# Altium footprint library NEXUS32.PcbLib: 39 footprints (part 1 of 3)
Each footprint in its own frame and in the unit in brackets; x right, y up, seen from the top. Pads: shape width x height; smd on the part's side, far side on the other; paste and mask are expansions set on the pad; w line width, h text height; cw(c..) or ccw(c..) is an arc to the next point about the centre after c.
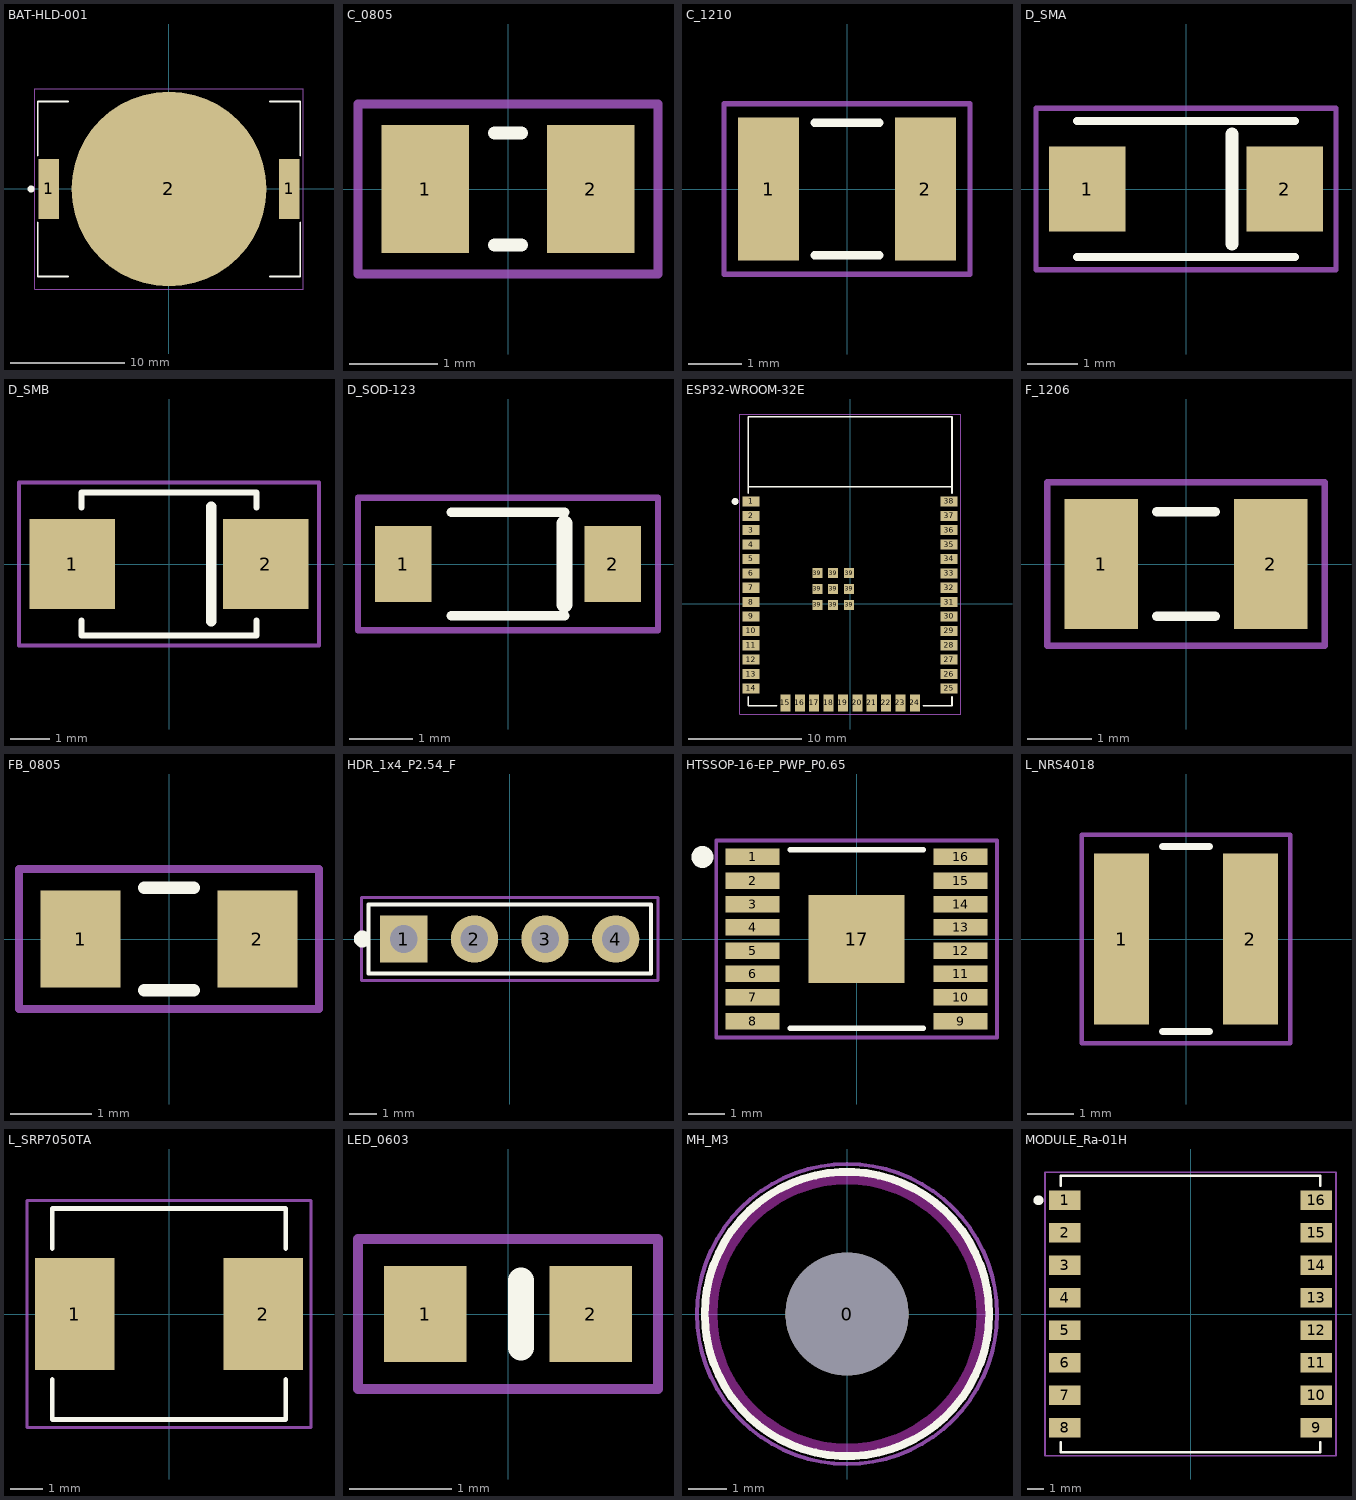
[diagram p0: the footprints below, top view; thin cyan lines are the x and y axes]

## BAT-HLD-001 [mil] "Portapilas CR2032 SMD TE BAT-HLD-001; pad 1 = (+) pestanas laterales, pad 2 = (-) pad central 17mm"
height 165.39
pads (3):
  rect 71x205 smd: 1(-413,0) 1(413,0)
  round 669 smd: 2(0,0)
Top Overlay:
  circle w12: c-474,0 r6
  lines w6: -451,-114 -451,-301 -346,-301 ; -451,114 -451,301 -346,301 ; 346,-301 451,-301 451,-114 ; 346,301 451,301 451,114
Mechanical 1:
  lines w4: -461,-344 -461,344 461,344 461,-344 -461,-344
3D body "BAT-HLD-001.step": height 165.39, standoff 0, extent -450.79,-300.65 450.79,305.74

## C_0805 [mil] "Condensador/ferrita 0805 (2012 metrico)"
height 51.18
pads (2):
  rect 39x57 smd: 1(-37,0) 2(37,0)
Top Overlay:
  lines w6: -6,-25 6,-25 ; -6,25 6,25
Mechanical 1:
  lines w4: -67,-38 -67,38 67,38 67,-38 -67,-38
3D body "C_0805.step": height 51.18, standoff 0, extent -39.37,-25.59 39.37,25.59

## C_1210 [mil] "Condensador 1210 (3225 metrico)"
height 98.43
pads (2):
  rect 45x106 smd: 1(-58,0) 2(58,0)
Top Overlay:
  lines w6: -24,-49 24,-49 ; -24,49 24,49
Mechanical 1:
  lines w4: -91,-63 91,-63 91,63 -91,63 -91,-63
3D body "C_1210.step": height 98.43, standoff 0, extent -62.99,-49.21 62.99,49.21

## D_SMA [mil] "Diodo SMA (DO-214AC) SS54; pad 1 = anodo, pad 2 = catodo (barra junto al pad 2)"
height 82.68
pads (2):
  rect 60x66 smd: 1(-77,0) 2(77,0)
Top Overlay:
  lines w6: -85,-53 85,-53 ; -85,53 85,53
  lines w10: 36,-43 36,43
Mechanical 1:
  lines w4: -117,-63 117,-63 117,63 -117,63 -117,-63
3D body "D_SMA.step": height 82.68, standoff 0, extent -102.36,-55.12 102.36,55.12

## D_SMB [mil] "Diodo TVS SMB (DO-214AA) SMBJ28A; pad 1 = anodo, pad 2 = catodo (barra junto al pad 2)"
height 82.68
pads (2):
  rect 85x89 smd: 1(-96,0) 2(96,0)
Top Overlay:
  lines w6: -87,-56 -87,-71 87,-71 87,-56 ; -87,56 -87,71 87,71 87,56
  lines w10: 42,-57 42,57
Mechanical 1:
  lines w4: -149,-81 149,-81 149,81 -149,81 -149,-81
3D body "D_SMB.step": height 82.68, standoff 0, extent -106.3,-70.87 106.3,70.87

## D_SOD-123 [mil] "Diodo SOD-123 (1N4148W); pad 1 = anodo, pad 2 = catodo (barra junto al pad 2)"
height 43.31
pads (2):
  rect 35x47 smd: 1(-65,0) 2(65,0)
Top Overlay:
  lines w6: -35,-32 35,-32 ; -35,32 35,32
  lines w10: 35,-25 35,25
Mechanical 1:
  lines w4: -93,-41 93,-41 93,41 -93,41 -93,-41
3D body "D_SOD-123.step": height 43.31, standoff 0, extent -74.8,-36.42 74.8,26.57

## ESP32-WROOM-32E [mil] "Modulo ESP32-WROOM-32E 18 x 25.5 (38 pines + pad GND 39 en 3x3); antena arriba"
height 122.09
pads (47):
  rect 59x35 smd: 1(-344,356) 2(-344,306) 3(-344,256) 4(-344,206) 5(-344,156) 6(-344,106) 7(-344,56) 8(-344,6) 9(-344,-44) 10(-344,-94) 11(-344,-144) 12(-344,-194) 13(-344,-244) 14(-344,-294) 25(344,-294) 26(344,-244) 27(344,-194) 28(344,-144) 29(344,-94) 30(344,-44) 31(344,6) 32(344,56) 33(344,106) 34(344,156) 35(344,206) 36(344,256) 37(344,306) 38(344,356)
  rect 35x59 smd: 15(-225,-344) 16(-175,-344) 17(-125,-344) 18(-75,-344) 19(-25,-344) 20(25,-344) 21(75,-344) 22(125,-344) 23(175,-344) 24(225,-344)
  rect 35x35 smd: 39(-114,-4) 39(-114,52) 39(-114,107) 39(-59,-4) 39(-59,52) 39(-59,107) 39(-4,-4) 39(-4,52) 39(-4,107)
Top Overlay:
  circle w12: c-400,356 r6
  lines w6: -354,-324 -354,-354 -255,-354 ; -354,385 -354,650 354,650 354,385 ; -354,407 354,407 ; 255,-354 354,-354 354,-324
Mechanical 1:
  lines w4: -384,-383 384,-383 384,660 -384,660 -384,-383
3D body "ESP32-WROOM-32E.step": height 122.09, standoff 0, extent -354.33,-353.25 354.33,650.68

## F_1206 [mil] "Fusible 1206 Littelfuse 0466"
height 23.62
pads (2):
  rect 45x80 smd: 1(-52,0) 2(52,0)
Top Overlay:
  lines w6: -18,-32 18,-32 ; -18,32 18,32
Mechanical 1:
  lines w4: -85,-50 85,-50 85,50 -85,50 -85,-50
3D body "F_1206.step": height 23.62, standoff 0, extent -62.99,-33.46 62.99,33.46

## FB_0805 [mil] "Ferrita 0805 Murata BLM21PG"
height 24.02
pads (2):
  rect 39x47 smd: 1(-43,0) 2(43,0)
Top Overlay:
  lines w6: -12,-25 12,-25 ; -12,25 12,25
Mechanical 1:
  lines w4: -73,-34 73,-34 73,34 -73,34 -73,-34
3D body "FB_0805.step": height 24.02, standoff 0, extent -25.61,-39.37 25.61,39.37

## HDR_1x4_P2.54_F [mil] "Cabezal hembra 1x4 2.54 (modulo OLED); pin 1 cuadrado (GND)"
height 334.65
pads (4):
  rect 67x67 hole 39: 1(-150,0)
  round 67 hole 39: 2(-50,0) 3(50,0) 4(150,0)
Top Overlay:
  circle w12: c-209,0 r6
  lines w6: -200,-49 200,-49 200,49 -200,49 -200,-49
Mechanical 1:
  lines w4: -210,-59 210,-59 210,59 -210,59 -210,-59
3D body "HDR_1x4_P2.54_F.step": height 334.65, standoff -118.11, extent -209.84,-49.23 209.84,49.23

## HTSSOP-16-EP_PWP_P0.65 [mil] "HTSSOP-16 PowerPAD TPS26600PWPR"
height 47.64
pads (17):
  rect 59x18 smd: 1(-114,90) 2(-114,64) 3(-114,38) 4(-114,13) 5(-114,-13) 6(-114,-38) 7(-114,-64) 8(-114,-90) 9(114,-90) 10(114,-64) 11(114,-38) 12(114,-13) 13(114,13) 14(114,38) 15(114,64) 16(114,90)
  rect 105x97 smd: 17(0,0)
Top Overlay:
  circle w12: c-169,90 r6
  lines w6: -73,-98 73,-98 ; -73,98 73,98
Mechanical 1:
  lines w4: -154,-108 154,-108 154,108 -154,108 -154,-108
3D body "HTSSOP-16-EP_PWP_P0.65.step": height 47.64, standoff 0, extent -126.97,-98.43 125,98.43

## L_NRS4018 [mil] "Inductor 4x4 Taiyo Yuden NRS4018 - recommended land pattern p.52"
height 71.65
pads (2):
  rect 47x146 smd: 1(-55,0) 2(55,0)
Top Overlay:
  lines w6: -20,-79 20,-79 ; -20,79 20,79
Mechanical 1:
  lines w4: -89,-89 -89,89 89,89 89,-89 -89,-89
3D body "L_NRS4018.step": height 71.65, standoff 0, extent -78.74,-78.74 78.74,78.74

## L_SRP7050TA [mil] "Inductor 7.3x6.6 Bourns SRP7050TA - recommended layout p.1"
height 114.17
pads (2):
  rect 98x138 smd: 1(-116,0) 2(116,0)
Top Overlay:
  lines w6: -144,-81 -144,-130 144,-130 144,-81 ; -144,81 -144,130 144,130 144,81
Mechanical 1:
  lines w4: -175,-140 175,-140 175,140 -175,140 -175,-140
3D body "L_SRP7050TA.step": height 114.17, standoff 0, extent -139.76,-129.92 139.76,129.92

## LED_0603 [mil] "LED 0603; pad 1 = anodo, pad 2 = catodo (barra de polaridad junto al pad 2)"
height 27.95
pads (2):
  rect 32x37 smd: 1(-32,0) 2(32,0)
Top Overlay:
  lines w10: 5,-13 5,13
Mechanical 1:
  lines w4: -58,-29 58,-29 58,29 -58,29 -58,-29
3D body "LED_0603.step": height 27.95, standoff 0, extent -15.94,-31.89 15.94,31.89

## MH_M3 [mil] "Agujero de montaje M3 NO chapado (NPTH) taladro 3.2 mm, sin cobre; exclusion de cobre/ruteo r=3.5 mm"
pads (1):
  round 126 hole 125.98 unplated: 0(0,0)
Top Overlay:
  circle w8: c0,0 r146
Keep-Out Layer:
  circle w10: c0,0 r138
Mechanical 1:
  circle w4: c0,0 r154

## MODULE_Ra-01H [mil] "Modulo LoRa Ai-Thinker Ra-01H 16 x 17 castellado (1 ANT, 2 GND, 3 3V3 ... 16 GND)"
height 126.02
pads (16):
  rect 77x47 smd: 1(-305,276) 2(-305,197) 3(-305,118) 4(-305,39) 5(-305,-39) 6(-305,-118) 7(-305,-197) 8(-305,-276) 9(305,-276) 10(305,-197) 11(305,-118) 12(305,-39) 13(305,39) 14(305,118) 15(305,197) 16(305,276)
Top Overlay:
  circle w12: c-369,276 r6
  lines w6: -315,-311 -315,-335 315,-335 315,-311 ; -315,311 -315,335 315,335 315,311
Mechanical 1:
  lines w4: -353,-344 -353,344 353,344 353,-344 -353,-344
3D body "MODULE_Ra-01H.step": height 126.02, standoff 0, extent -314.96,-334.65 314.96,334.65